# Altium integrated library PSOC.IntLib: 42 symbols
Pins are listed as number, name and electrical type; pins without a type are passive.

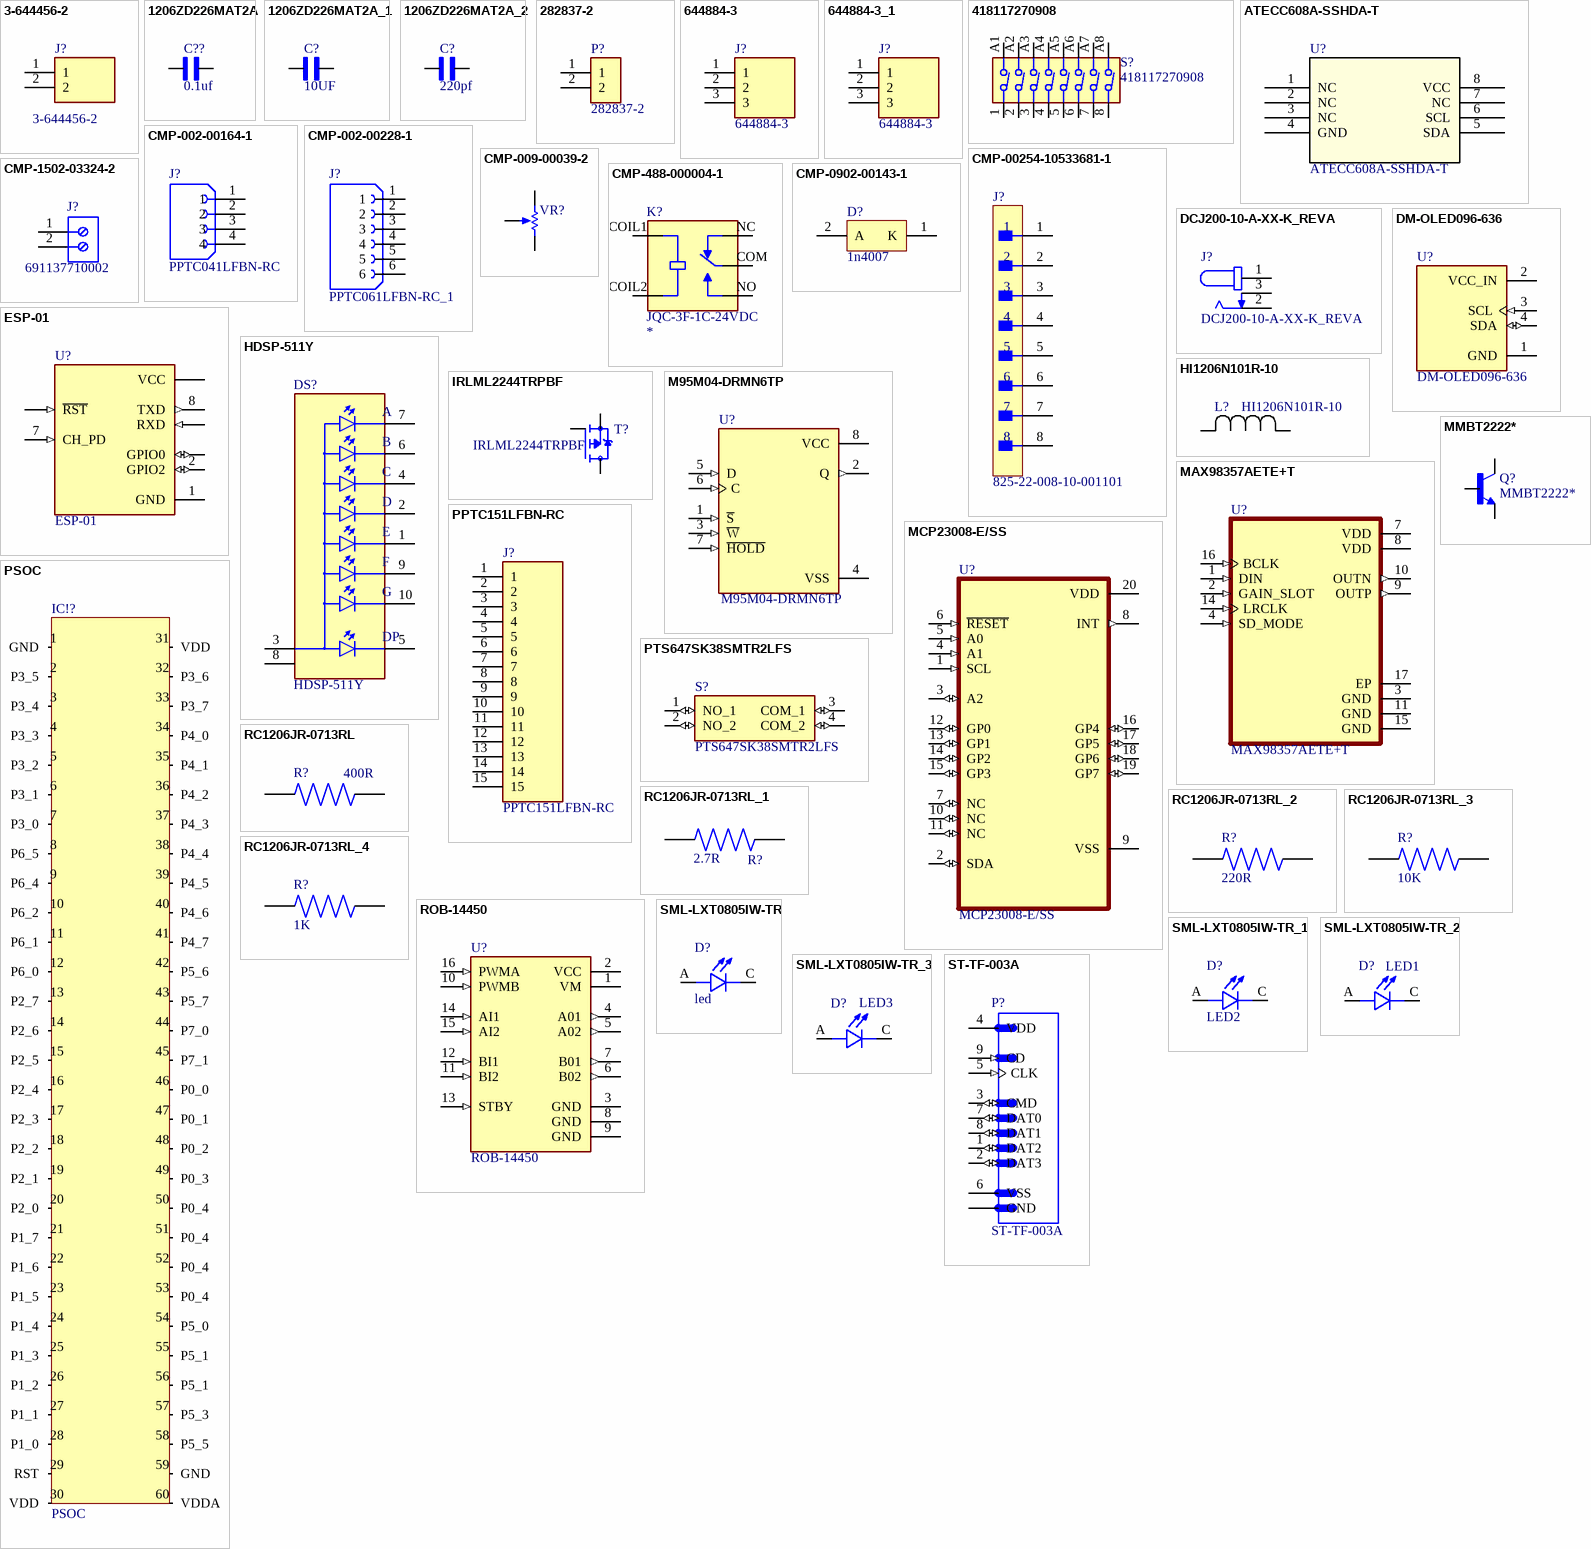
[diagram p0: symbols 3-644456-2 to ST-TF-003A]

## 3-644456-2
designator J?
HEADER ASSEMBLY, NARROW, MTA-100, 2 POSITION, STRAIGHT | TE Connectivity 3-644456-2; SnapEDA_Link: https://www.snapeda.com/parts/3-644456-2/TE+Connectivity+AMP+Connectors/view-part/?ref=snap; Package: None; Value: *; MF: TE Connectivity; MP: 3-644456-2; Check_prices: https://www.snapeda.com/parts/3-644456-2/TE+Connectivity+AMP+Connectors/view-part/?ref=eda
footprint TE_3-644456-2
pins: 1, 2

## 1206ZD226MAT2A
designator C??, comment 0.1uf
0,1 ÂµF Â±%10 16V Seramik KondansatÃ¶r X7R 0402 (1005 Metrik); MF: AVX; MP: 1206ZD226MAT2A; SnapEDA_Link: https://www.snapeda.com/parts/1206ZD226MAT2A/AVX/view-part/?ref=snap; Package: 3216 AVX; Value: *; Check_prices: https://www.snapeda.com/parts/1206ZD226MAT2A/AVX/view-part/?ref=eda
footprint CAPC3216X229N
pins: 1, 2

## 1206ZD226MAT2A_1
designator C?, comment 10UF
MF: AVX; MP: 1206ZD226MAT2A; SnapEDA_Link: https://www.snapeda.com/parts/1206ZD226MAT2A/AVX/view-part/?ref=snap; Package: 3216 AVX; Value: *; Check_prices: https://www.snapeda.com/parts/1206ZD226MAT2A/AVX/view-part/?ref=eda
footprint CAPC3216X229N
pins: 1, 2

## 1206ZD226MAT2A_2
designator C?, comment 220pf
MF: AVX; MP: 1206ZD226MAT2A; SnapEDA_Link: https://www.snapeda.com/parts/1206ZD226MAT2A/AVX/view-part/?ref=snap; Package: 3216 AVX; Value: *; Check_prices: https://www.snapeda.com/parts/1206ZD226MAT2A/AVX/view-part/?ref=eda
footprint CAPC3216X229N
pins: 1, 2

## 282837-2
designator P?
Ð Ð°Ð·ÑŠÐµÐ¼Ð½Ñ‹Ðµ ÐºÐ»ÐµÐ¼Ð¼Ð½Ñ‹Ðµ ÐºÐ¾Ð»Ð¾Ð´ÐºÐ¸ Ð Ð¾Ð·ÐµÑ‚ÐºÐ° 2 Ð¿Ð¾Ð»Ð¾Ð¶ÐµÐ½Ð¸Ñ 5,08 Ð¼Ð¼ ÐŸÑ€Ð¸Ð¿Ð¾Ð¹ Ð¿Ñ€ÑÐ¼Ð¾Ð¹ Ñ‡ÐµÑ€ÐµÐ· Ð¾Ñ‚Ð²ÐµÑ€ÑÑ‚Ð¸Ðµ 13,5 Ð / ÐºÐ¾Ð½Ñ‚Ð°ÐºÑ‚; MF: TE Connectivity; SnapEDA_Link: https://www.snapeda.com/parts/282837-2/TE+Connectivity+AMP+Connectors/view-part/?ref=snap; Price: None; Check_prices: https://www.snapeda.com/parts/282837-2/TE+Connectivity+AMP+Connectors/view-part/?ref=eda; Purchase-URL: https://pricing.snapeda.com/search/part/282837-2/?ref=eda; MP: 282837-2; Value: *; Availability: In Stock; Package: None
footprint TE_282837-2
pins: 1, 2

## 644884-3
designator J?
Conn Unshrouded Header HDR 3 POS 2.54mm Solder ST Thru-Hole Bag/Box; MF: TE Connectivity; SnapEDA_Link: https://www.snapeda.com/parts/644884-3/TE+Connectivity+AMP+Connectors/view-part/?ref=snap; Package: None; Value: *; MP: 644884-3; EU_RoHS_Compliance: Compliant; Check_prices: https://www.snapeda.com/parts/644884-3/TE+Connectivity+AMP+Connectors/view-part/?ref=eda
footprint TE_644884-3
pins: 1, 2, 3

## 644884-3_1
designator J?, comment 644884-3
Conn Unshrouded Header HDR 3 POS 2.54mm Solder ST Thru-Hole Bag/Box; MF: TE Connectivity; SnapEDA_Link: https://www.snapeda.com/parts/644884-3/TE+Connectivity+AMP+Connectors/view-part/?ref=snap; Package: None; Value: *; MP: 644884-3; EU_RoHS_Compliance: Compliant; Check_prices: https://www.snapeda.com/parts/644884-3/TE+Connectivity+AMP+Connectors/view-part/?ref=eda
footprint TE_644884-3
pins: 1, 2, 3

## 418117270908
designator S?
Dip Switch SPST 8 Position Through Hole Slide (Standard) Actuator 25mA 24VDC; MF: WÃ¼rth Elektronik; SnapEDA_Link: https://www.snapeda.com/parts/418117270908/W%25C3%25BCrth+Elektronik+Midcom/view-part/?ref=snap; Package: None; Value: *; MP: 418117270908; Check_prices: https://www.snapeda.com/parts/418117270908/W%25C3%25BCrth+Elektronik+Midcom/view-part/?ref=eda
footprint 418117270908
pins: 1, 2, 3, 4, 5, 6, 7, 8, A1, A2, A3, A4, A5, A6, A7, A8

## ATECC608A-SSHDA-T
designator U?
Description; Manufacturer_Name: Microchip; Copyright: Copyright (C) 2025 Ultra Librarian. All rights reserved.; Manufacturer_Part_Number: ATECC608A-SSHDA-T; RefDes: RefDes; Type: Type
footprint SOIC8_4P9X3P9MC_MCH
pins: 1 NC, 2 NC, 3 NC, 4 GND (power), 5 SDA, 6 SCL, 7 NC, 8 VCC (power)

## CMP-002-00164-1
designator J?, comment PPTC041LFBN-RC
4 Position Header Connector 0.100 (2.54mm) Through Hole Tin; MF: Sullins Connector; Pins: 4; Check_prices: https://www.snapeda.com/parts/PPTC041LFBN-RC/Sullins/view-part/?ref=eda; Case/Package: None; Component Type: Standard; Source: VSD FPGA.SCHLIB; Design Item ID: PPTC041LFBN-RC; MP: PPTC041LFBN-RC; Value: *; SnapEDA_Link: https://www.snapeda.com/parts/PPTC041LFBN-RC/Sullins/view-part/?ref=snap; Component Type: Connectors
footprint SULLINS_PPTC041LFBN-RC
pins: 1, 2, 3, 4

## CMP-002-00228-1
designator J?, comment PPTC061LFBN-RC_1
6 Position Header Connector 0.100 (2.54mm) Through Hole Tin; MF: Sullins Connector; MP: PPTC061LFBN-RC; Value: *; Pins: 6; Design Item ID: PPTC061LFBN-RC_1; SnapEDA_Link: https://www.snapeda.com/parts/PPTC061LFBN-RC/Sullins+Connector+Solutions/view-part/?ref=snap; Component Type: Standard; Check_prices: https://www.snapeda.com/parts/PPTC061LFBN-RC/Sullins+Connector+Solutions/view-part/?ref=eda; Source: Maze_Solver_2_Layer.SCHLIB; Case/Package: None; Component Type: Connectors
footprint SULLINS_PPTC061LFBN-RC
pins: 1, 2, 3, 4, 5, 6

## CMP-009-00039-2
designator VR?, comment 3362P-1-103LF  (value not drawn)
Square Trimpot(R) Trimming Potentiometer, 10 KOhm, 300 V, -55 to 125 degC, 3-Pin THD, RoHS, Tube; Manufacturer: Bourns; Tolerance: 10%; Power: 500mW; Voltage Rating: 300V; Resistance: 10k; Packaging: Rail/Tube; Package Reference: 3326P; Manufacturer URL: http://www.bourns.com/; Composition: Potentiometer; Package Description: 3-Pin Through Hole Device, Body 6.6 x 6.99 mm, Pitch 2.54 mm; Max Operating Temperature: 125°C; Min Operating Temperature: -55°C; Datasheet Version: May-16; Lead Pitch: 2.54mm; Pins: 3; Datasheet URL: http://www.bourns.com/docs/Product-Datasheets/3362.pdf; Package Quantity: 250; Case/Package: 3326P; RoHS Compliant: True; Mounting Technology: TH; Manufacturer Part Number: 3362P-1-103LF; Component Type: Resistors
footprint BOUR-3362P (THD, 3-Leads, Body 6.6x6.99mm, Pitch 2.54mm)
pins: 1 CCW, 2 S, 3 CW

## CMP-00254-10533681-1
designator J?, comment 825-22-008-10-001101
Headers & Wire Housings SPRING LOADED HEADER 1R 8P VERT MNT TH; Pitch: 2.54mm; Number of Positions: 8; Current Rating: 2A; Voltage Rating: 150V; Lead Free: Lead Free; RoHS: Compliant; Height: 7.92mm; REACH SVHC: No SVHC; Contact Plating: Gold; Contact Gender: Male; Termination: Through Hole; Min Operating Temperature: -55°C; Row Spacing: 2.54mm; Max Operating Temperature: 125°C; Number of Contacts: 8; Contact Material: Gold, Nickel; Number of Rows: 1
footprint FP-825-22-008-10-001101_MFG
pins: 1, 2, 3, 4, 5, 6, 7, 8

## CMP-488-000004-1
designator K?, comment JQC-3F-1C-24VDC
Miniature PCB Relay 24VDC, 10A 250VAC, 15A 125VAC, 10A 250VAC; Availability: Unavailable; Component Type: Standard; Design Item ID: JQC-3F-1C-24VDC; Value: *; Source: CLASSROOM  - Copy.SCHLIB; Price: None; Pin Count: 5; Package: None; MP: JQC-3F-1C-24VDC
footprint RELAY_JQC-3F-1C-24VDC
pins: COIL1, COIL2, COM, NC, NO

## CMP-0902-00143-1
designator D?, comment 1n4007
Standard Recovery Rectifier, 2-Pin Axial_Lead, Pb-Free, Bulk Bag; PartNumber: 1N4007G; Manufacturer: On Semiconductor; VRRM Max (V): 1000; IFSM Max (A): 30; IO(rec) Max (A): 1; ComponentLink2Description: Datasheet; ComponentLink2URL: http://www.onsemi.com/pub_link/Collateral/1N4001-D.PDF; PackageDescription: 2-Pin, Axial Lead, Diameter 2.35 mm; ComponentLink1URL: http://www.onsemi.com/; ComponentLink3URL: http://www.onsemi.cn/pub_link/Collateral/59-10.PDF; PackageReference: AXIAL_LEAD-2-59-10; ComponentLink1Description: Manufacturer URL; Mounting Technology: Through Hole; ComponentLink3Description: Package Specification; Packing: Bulk Bag; PackageVersion: Rev. U, 02/2005; DatasheetVersion: Rev. 13; RoHS: TRUE; Type: Standard Recovery
footprint ONSC-AXIAL_LEAD-2-59-10_P (AXIAL, 2-Leads, Diameter 2.35mm)
pins: 1 K, 2 A

## CMP-1502-03324-2
designator J?, comment 691137710002
NexarPartId: 78871135; Voltage Rating: 300V; Number of Contacts: 2; Current Rating: 16A; Lead Pitch: 5mm; Height: 11.6mm; Packaging: Box; RoHS: Non-Compliant; Contact Material: Nickel, Tin; Max Operating Temperature: 120°C; Number of Pins: 2; Min Operating Temperature: -30°C; Number of Rows: 1
footprint 691137710002 (Series 1377 - 5.00 mm Horizontal Entry with Pressure Clamp WR-TBL, 2 pin)
pins: 1, 2

## DCJ200-10-A-XX-K_REVA
designator J?
Power Barrel Connector Jack 2.05mm ID (0.081), 5.50mm OD (0.217) Through Hole, Right Angle; MF: Global Connector Technology; MP: DCJ200-10-A-K1-K; SnapEDA_Link: https://www.snapeda.com/parts/DCJ200-10-A-K1-K/Global+Connector+Technology/view-part/?ref=snap; Package: None; Value: *; Check_prices: https://www.snapeda.com/parts/DCJ200-10-A-K1-K/Global+Connector+Technology/view-part/?ref=eda
footprint GCT_DCJ200-10-A-XX-K_REVA
pins: 1, 2, 3

## DM-OLED096-636
designator U?
0.96â€ 128 X 64 MONOCHROME GRAPHIC OLED DISPLAY MODULE - I2C; SnapEDA_Link: https://www.snapeda.com/parts/DM-OLED096-636/Display+Module/view-part/?ref=snap; Package: Package; Value: *; MF: Display Module; MP: DM-OLED096-636; Check_prices: https://www.snapeda.com/parts/DM-OLED096-636/Display+Module/view-part/?ref=eda
footprint MODULE_DM-OLED096-636
pins: 1 GND (power), 2 VCC_IN (power), 3 SCL (in), 4 SDA (io)

## ESP-01
designator U?
ESP-01M ESP8266 DIP Adapter series Transceiver; 802.11 b/g/n (Wi-Fi, WiFi, WLAN) Evaluation Board; MF: AI-Thinker; SnapEDA_Link: https://www.snapeda.com/parts/ESP-01/AI-Thinker/view-part/?ref=snap; Package: Non-Standard AI-Thinker; Value: *; MP: ESP-01; Check_prices: https://www.snapeda.com/parts/ESP-01/AI-Thinker/view-part/?ref=eda
footprint MODULE_ESP-01
pins: 1 GND (power), 2 GPIO2 (io), 3 GPIO0 (io), 4 RXD (in), 5 VCC (power), 6 ~{RST} (in), 7 CH_PD (in), 8 TXD (out)

## HDSP-511Y
designator DS?
Display Modules - LED Character and Numeric Yellow 7-Segment 1 Character Common Anode 2.15V 20mA 0.673 H x 0.488 W x 0.315 D (17.10mm x 12.40mm x 8.00mm) 10-DIP (0.600, 15.24mm); MF: Broadcom Limited; SnapEDA_Link: https://www.snapeda.com/parts/HDSP-511Y/Broadcom/view-part/?ref=snap; Package: None; Value: *; MP: HDSP-511Y; Check_prices: https://www.snapeda.com/parts/HDSP-511Y/Broadcom/view-part/?ref=eda
footprint LED_HDSP-511Y
pins: 1 E, 2 D, 3 COM, 4 C, 5 DP, 6 B, 7 A, 8 COM, 9 F, 10 G

## HI1206N101R-10
designator L?
Description; Manufacturer_Name: Laird; Copyright: Copyright (C) 2025 Ultra Librarian. All rights reserved.; Manufacturer_Part_Number: HI1206N101R-10
footprint IND_HI1206N101R-10_LRD
pins: 1, 2

## IRLML2244TRPBF
designator T?
IRLML2244TRPBF P-channel MOSFET Transistor, 4.3 A, 20 V, 3-Pin SOT-23 | Infineon IRLML2244TRPBF; SnapEDA_Link: https://www.snapeda.com/parts/IRLML2244TRPBF/Infineon+Technologies/view-part/?ref=snap; Package: SOT-23-3 ON Semiconductor; Value: *; MF: Infineon; MP: IRLML2244TRPBF; Check_prices: https://www.snapeda.com/parts/IRLML2244TRPBF/Infineon+Technologies/view-part/?ref=eda
footprint SOT-23
pins: 1 G, 2 S, 3 D

## M95M04-DRMN6TP
designator U?
EEPROM Memory IC 4Mb (512K x 8) SPI 10 MHz 8-SOIC; MF: STMicroelectronics; SnapEDA_Link: https://www.snapeda.com/parts/M95M04-DRMN6TP/STMicroelectronics/view-part/?ref=snap; Package: None; Value: *; MP: M95M04-DRMN6TP; Check_prices: https://www.snapeda.com/parts/M95M04-DRMN6TP/STMicroelectronics/view-part/?ref=eda
footprint SOIC127P600X175-8N
pins: 1 ~{S} (in), 2 Q (out), 3 ~{W} (in), 4 VSS (power), 5 D (in), 6 C (in), 7 ~{HOLD} (in), 8 VCC (power)

## MAX98357AETE+T
designator U?
Tiny, Low-Cost, PCM Class D Amplifier with Class AB Performance; MF: Analog Devices; SnapEDA_Link: https://www.snapeda.com/parts/MAX98357AETE+T/Analog+Devices/view-part/?ref=snap; Package: TQFN-16 Maxim; Value: *; MP: MAX98357AETE+T; Check_prices: https://www.snapeda.com/parts/MAX98357AETE+T/Analog+Devices/view-part/?ref=eda
footprint QFN50P300X300X80-17N
pins: 1 DIN (in), 2 GAIN_SLOT (in), 3 GND (power), 4 SD_MODE (in), 7 VDD (power), 8 VDD (power), 9 OUTP (out), 10 OUTN (out), 11 GND (power), 14 LRCLK (in), 15 GND (power), 16 BCLK (in), 17 EP (power)

## MCP23008-E/SS
designator U?
Microchip MCP23008-E/SS, 8-channel 8bit I/O Expander 1.7MHz, I2C, 20-Pin SSOP | Microchip Technology Inc. MCP23008-E/SS; SnapEDA_Link: https://www.snapeda.com/parts/MCP23008-E/SS/Microchip/view-part/?ref=snap; Package: SSOP-20 Microchip; Value: *; MF: Microchip Technology; MP: MCP23008-E/SS; Check_prices: https://www.snapeda.com/parts/MCP23008-E/SS/Microchip/view-part/?ref=eda
footprint SOP65P780X200-20N
pins: 1 SCL (in), 2 SDA (io), 3 A2 (io), 4 A1 (in), 5 A0 (in), 6 ~{RESET} (in), 7 NC (io), 8 INT (out), 9 VSS (power), 10 NC (io), 11 NC (io), 12 GP0 (io), 13 GP1 (io), 14 GP2 (io), 15 GP3 (io), 16 GP4 (io), 17 GP5 (io), 18 GP6 (io), 19 GP7 (io), 20 VDD (power)

## MMBT2222*
designator Q?
Bipolar (BJT) Transistor NPN 30 V 600 mA 250MHz 300 mW Surface Mount SOT-23-3 (TO-236); MF: ON Semiconductor; SnapEDA_Link: https://www.snapeda.com/parts/MMBT2222/Onsemi/view-part/?ref=snap; Package: SOT-23-3 Fairchild Semiconductor; Value: *; MP: MMBT2222; Check_prices: https://www.snapeda.com/parts/MMBT2222/Onsemi/view-part/?ref=eda
footprint SOT23-BEC
pins: B, C, E

## PPTC151LFBN-RC
designator J?
CONN HDR 15POS 0.1 TIN PCB; Manufacturer_Name: Sullins; Geometry.Height: 8.5mm; Manufacturer_Part_Number: PPTC151LFBN-RC; Mouser Part Number: *; Mouser Price/Stock: *; Arrow Part Number: *; Arrow Price/Stock: *; Datasheet Link: https://www.digikey.com/en/products/detail/sullins-connector-solutions/PPTC151LFBN-RC/810153
footprint RHDR15W85P0X254_1X15_3708X254X850P
pins: 1, 2, 3, 4, 5, 6, 7, 8, 9, 10, 11, 12, 13, 14, 15

## PSOC
designator IC!?
footprint PCBComponent_1
pins: 1 GND (power), 2 P3_5 (io), 3 P3_4 (io), 4 P3_3 (io), 5 P3_2 (io), 6 P3_1 (io), 7 P3_0 (io), 8 P6_5 (io), 9 P6_4 (io), 10 P6_2 (io), 11 P6_1 (io), 12 P6_0 (io), 13 P2_7 (io), 14 P2_6 (io), 15 P2_5 (io), 16 P2_4 (io), 17 P2_3 (io), 18 P2_2 (io), 19 P2_1 (io), 20 P2_0 (io), 21 P1_7 (io), 22 P1_6 (io), 23 P1_5 (io), 24 P1_4 (io), 25 P1_3 (io), 26 P1_2 (io), 27 P1_1 (io), 28 P1_0 (io), 29 RST (io), 30 VDD (power), 31 VDD (io), 32 P3_6 (io), 33 P3_7 (io), 34 P4_0 (io), 35 P4_1 (io), 36 P4_2 (io), 37 P4_3 (io), 38 P4_4 (io), 39 P4_5 (io), 40 P4_6 (io), 41 P4_7 (io), 42 P5_6 (io), 43 P5_7 (io), 44 P7_0 (io), 45 P7_1 (io), 46 P0_0 (io), 47 P0_1 (in), 48 P0_2 (io), 49 P0_3 (io), 50 P0_4 (io), 51 P0_4 (io), 52 P0_4 (io), 53 P0_4 (io), 54 P5_0 (io), 55 P5_1 (io), 56 P5_1 (io), 57 P5_3 (io), 58 P5_5 (io), 59 GND (power), 60 VDDA (power)

## PTS647SK38SMTR2LFS
designator S?
Tactile Switch SPST-NO Top Actuated Surface Mount; MF: C&K; SnapEDA_Link: https://www.snapeda.com/parts/PTS%20647%20SK38%20SMTR2%20LFS/C%2526K/view-part/?ref=snap; Package: None; Value: *; MP: PTS 647 SK38 SMTR2 LFS; Check_prices: https://www.snapeda.com/parts/PTS%20647%20SK38%20SMTR2%20LFS/C%2526K/view-part/?ref=eda
footprint PTS647SK38SMTR2LFS
pins: 1 NO_1 (io), 2 NO_2 (io), 3 COM_1 (io), 4 COM_2 (io)

## RC1206JR-0713RL
designator R?, comment 400R
MP: RC1206JR-0713RL; MF: Yageo; Check_prices: https://www.snapeda.com/parts/RC1206JR-0713RL/Yageo/view-part/?ref=eda; Value: *; Availability: In Stock; Price: None; Package: 3116 Yageo; SnapEDA_Link: https://www.snapeda.com/parts/RC1206JR-0713RL/Yageo/view-part/?ref=snap; Purchase-URL: https://pricing.snapeda.com/search/part/RC1206JR-0713RL/?ref=eda
footprint RESC3116X65N
pins: 1, 2

## RC1206JR-0713RL_1
designator R?, comment 2.7R
MP: RC1206JR-0713RL; MF: Yageo; Check_prices: https://www.snapeda.com/parts/RC1206JR-0713RL/Yageo/view-part/?ref=eda; Value: *; Availability: In Stock; Price: None; Package: 3116 Yageo; SnapEDA_Link: https://www.snapeda.com/parts/RC1206JR-0713RL/Yageo/view-part/?ref=snap; Purchase-URL: https://pricing.snapeda.com/search/part/RC1206JR-0713RL/?ref=eda
footprint RESC3116X65N
pins: 1, 2

## RC1206JR-0713RL_2
designator R?, comment 220R
MP: RC1206JR-0713RL; MF: Yageo; Check_prices: https://www.snapeda.com/parts/RC1206JR-0713RL/Yageo/view-part/?ref=eda; Value: *; Availability: In Stock; Price: None; Package: 3116 Yageo; SnapEDA_Link: https://www.snapeda.com/parts/RC1206JR-0713RL/Yageo/view-part/?ref=snap; Purchase-URL: https://pricing.snapeda.com/search/part/RC1206JR-0713RL/?ref=eda
footprint RESC3116X65N
pins: 1, 2

## RC1206JR-0713RL_3
designator R?, comment 10K
MP: RC1206JR-0713RL; MF: Yageo; Check_prices: https://www.snapeda.com/parts/RC1206JR-0713RL/Yageo/view-part/?ref=eda; Value: *; Availability: In Stock; Price: None; Package: 3116 Yageo; SnapEDA_Link: https://www.snapeda.com/parts/RC1206JR-0713RL/Yageo/view-part/?ref=snap; Purchase-URL: https://pricing.snapeda.com/search/part/RC1206JR-0713RL/?ref=eda
footprint RESC3116X65N
pins: 1, 2

## RC1206JR-0713RL_4
designator R?, comment 1K
MP: RC1206JR-0713RL; MF: Yageo; Check_prices: https://www.snapeda.com/parts/RC1206JR-0713RL/Yageo/view-part/?ref=eda; Value: *; Availability: In Stock; Price: None; Package: 3116 Yageo; SnapEDA_Link: https://www.snapeda.com/parts/RC1206JR-0713RL/Yageo/view-part/?ref=snap; Purchase-URL: https://pricing.snapeda.com/search/part/RC1206JR-0713RL/?ref=eda
footprint RESC3116X65N
pins: 1, 2

## ROB-14450
designator U?
TB6612FNG Motor Controller/Driver Power Management Evaluation Board; MF: SparkFun Electronics; Check_prices: https://www.snapeda.com/parts/ROB-14450/SparkFun%20Electronics/view-part/2656367/?ref=eda; Package: None; MP: ROB-14450; Value: *; Availability: In Stock; SnapEDA_Link: https://www.snapeda.com/parts/ROB-14450/SparkFun%20Electronics/view-part/2656367/?ref=snap; Price: None
footprint MODULE_ROB-14450
pins: 1 VM (power), 2 VCC (power), 3 GND (power), 4 A01 (out), 5 A02 (out), 6 B02 (out), 7 B01 (out), 8 GND (power), 9 GND (power), 10 PWMB (in), 11 BI2 (in), 12 BI1 (in), 13 STBY (in), 14 AI1 (in), 15 AI2 (in), 16 PWMA (in)

## SML-LXT0805IW-TR
designator D?, comment led
LED;Red;11mcd;0.061In.Dia.;SMD;100mA;2V Vf;635nm;140deg;SMD;White Diffused;5V Vr | Lumex SML-LXT0805IW-TR; MF: Lumex Opto/Components; SnapEDA_Link: https://www.snapeda.com/parts/SML-LXT0805IW-TR/Lumex+Opto%252FComponents+Inc./view-part/?ref=snap; Package: 0805 Lumex; Value: *; MP: SML-LXT0805IW-TR; Check_prices: https://www.snapeda.com/parts/SML-LXT0805IW-TR/Lumex+Opto%252FComponents+Inc./view-part/?ref=eda
footprint LEDC2012X120N
pins: A, C

## SML-LXT0805IW-TR_1
designator D?, comment LED2
LED;Red;11mcd;0.061In.Dia.;SMD;100mA;2V Vf;635nm;140deg;SMD;White Diffused;5V Vr | Lumex SML-LXT0805IW-TR; MF: Lumex Opto/Components; SnapEDA_Link: https://www.snapeda.com/parts/SML-LXT0805IW-TR/Lumex+Opto%252FComponents+Inc./view-part/?ref=snap; Package: 0805 Lumex; Value: *; MP: SML-LXT0805IW-TR; Check_prices: https://www.snapeda.com/parts/SML-LXT0805IW-TR/Lumex+Opto%252FComponents+Inc./view-part/?ref=eda
footprint LEDC2012X120N
pins: A, C

## SML-LXT0805IW-TR_2
designator D?, comment LED1
LED;Red;11mcd;0.061In.Dia.;SMD;100mA;2V Vf;635nm;140deg;SMD;White Diffused;5V Vr | Lumex SML-LXT0805IW-TR; MF: Lumex Opto/Components; SnapEDA_Link: https://www.snapeda.com/parts/SML-LXT0805IW-TR/Lumex+Opto%252FComponents+Inc./view-part/?ref=snap; Package: 0805 Lumex; Value: *; MP: SML-LXT0805IW-TR; Check_prices: https://www.snapeda.com/parts/SML-LXT0805IW-TR/Lumex+Opto%252FComponents+Inc./view-part/?ref=eda
footprint LEDC2012X120N
pins: A, C

## SML-LXT0805IW-TR_3
designator D?, comment LED3
LED;Red;11mcd;0.061In.Dia.;SMD;100mA;2V Vf;635nm;140deg;SMD;White Diffused;5V Vr | Lumex SML-LXT0805IW-TR; MF: Lumex Opto/Components; SnapEDA_Link: https://www.snapeda.com/parts/SML-LXT0805IW-TR/Lumex+Opto%252FComponents+Inc./view-part/?ref=snap; Package: 0805 Lumex; Value: *; MP: SML-LXT0805IW-TR; Check_prices: https://www.snapeda.com/parts/SML-LXT0805IW-TR/Lumex+Opto%252FComponents+Inc./view-part/?ref=eda
footprint LEDC2012X120N
pins: A, C

## ST-TF-003A
designator P?
Micro SD Card Socket; Price: None; MP: ST-TF-003A; Availability: Unavailable; Value: *; Package: None
footprint SUNTECH_ST-TF-003A
pins: 1 DAT2 (io), 2 DAT3 (io), 3 CMD (io), 4 VDD (power), 5 CLK (in), 6 VSS, 7 DAT0 (io), 8 DAT1 (io), 9 CD (in), G1 GND, G2 GND, G3 GND, G4 GND

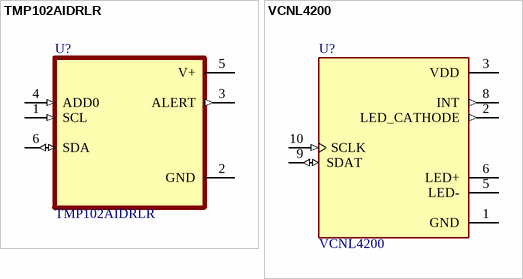
[diagram p1: symbols TMP102AIDRLR to VCNL4200]

## TMP102AIDRLR
designator U?
2C digital temperature sensor, I2C/SMBus in 2.56mm2 package; MF: Texas Instruments; Check_prices: https://www.snapeda.com/parts/TMP102AIDRLR/Texas+Instruments/view-part/?ref=eda; Value: *; Availability: In Stock; MP: TMP102AIDRLR; Price: None; Package: SOT-5X3-6 Texas Instruments; SnapEDA_Link: https://www.snapeda.com/parts/TMP102AIDRLR/Texas+Instruments/view-part/?ref=snap; Purchase-URL: https://pricing.snapeda.com/search/part/TMP102AIDRLR/?ref=eda
footprint SOT50P160X60-6N
pins: 1 SCL (in), 2 GND (power), 3 ALERT (out), 4 ADD0 (in), 5 V+ (power), 6 SDA (io)

## VCNL4200
designator U?
Optical Sensor Ambient 550nm IÂ²C 10-SMD Module; MF: Vishay Semiconductor; SnapEDA_Link: https://www.snapeda.com/parts/VCNL4200/Vishay%20Semiconductor%20Opto%20Division/view-part/1174507/?ref=snap; Availability: Unavailable; MP: VCNL4200; Price: None; Value: *; Package: SMD-10 Vishay
footprint SENSOR_VCNL4200
pins: 1 GND (power), 2 LED_CATHODE (out), 3 VDD (power), 5 LED-, 6 LED+, 8 INT (out), 9 SDAT (io), 10 SCLK (in)